# Altium schematic symbol library RMCF1206FT4K70.SchLib: 1 symbol
Pins are listed as number, name and electrical type; pins without a type are passive.

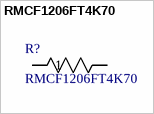
[diagram p0: symbol RMCF1206FT4K70]

## RMCF1206FT4K70
designator R?
Description; Manufacturer_Name: Stackpole International; Copyright: Copyright (C) 2026 Ultra Librarian. All rights reserved.; Manufacturer_Part_Number: RMCF1206FT4K70
footprint STA_RMCF1206_STP
pins: 1, 2